# Altium schematic symbol library CVCO55BE-0400-0800.SchLib: 1 symbol
Pins are listed as number, name and electrical type; pins without a type are passive.

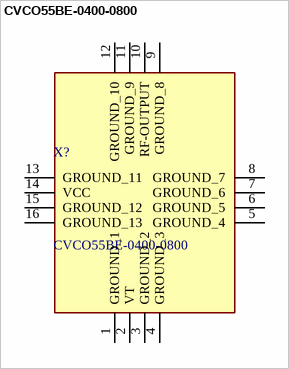
[diagram p0: symbol CVCO55BE-0400-0800]

## CVCO55BE-0400-0800
designator X?
VCO Oscillators 400MHz-800MHz; Manufacturer_Name: Crystek; Geometry.Height: 3.81mm; Manufacturer_Part_Number: CVCO55BE-0400-0800; Mouser Part Number: 549-CV55BE0400-0800; Mouser Price/Stock: https://www.mouser.co.uk/ProductDetail/Crystek-Corporation/CVCO55BE-0400-0800?qs=O9nmv0aA33UiGXPclCNPWQ%3D%3D; Arrow Part Number: *; Arrow Price/Stock: *; Datasheet Link: http://www.crystek.com/microwave/admin/webapps/welcome/files/vco/CVCO55BE-0400-0800.pdf
footprint CVCO55BE04000800
pins: 1 GROUND_1, 2 VT, 3 GROUND_2, 4 GROUND_3, 5 GROUND_4, 6 GROUND_5, 7 GROUND_6, 8 GROUND_7, 9 GROUND_8, 10 RF-OUTPUT, 11 GROUND_9, 12 GROUND_10, 13 GROUND_11, 14 VCC, 15 GROUND_12, 16 GROUND_13